# Altium integrated library Serigrafias.IntLib: 13 symbols
Pins are listed as number, name and electrical type; pins without a type are passive.

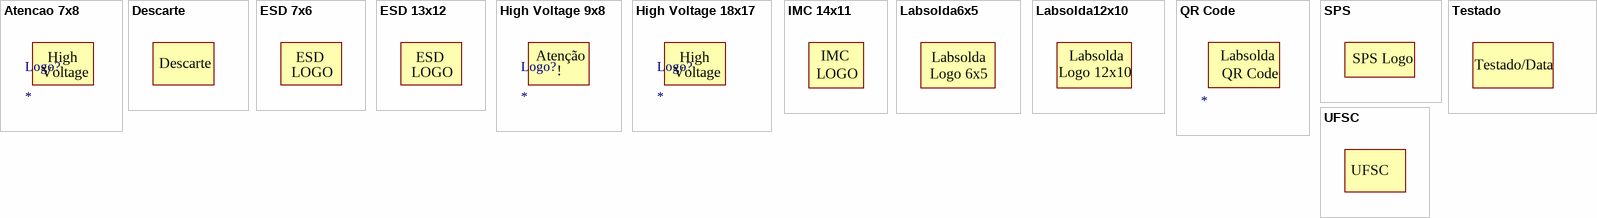
[diagram p0: symbols Atencao 7x8 to UFSC]

## Atencao 7x8
designator Logo?  (no BOM)
footprint Atencao 7x8
text: High; Voltage

## Descarte
designator Logo?  (value not drawn)  (no BOM)
footprint DESCARTE7x7
footprint DESCARTE 11X11

## ESD 7x6
designator Logo?  (value not drawn)  (no BOM)
footprint ESD 7x6
text: ESD; LOGO

## ESD 13x12
designator Logo?  (value not drawn)  (no BOM)
footprint ESD13x12
text: ESD; LOGO

## High Voltage 9x8
designator Logo?  (no BOM)
footprint High Voltage 9x8
text: Atenção; !

## High Voltage 18x17
designator Logo?  (no BOM)
footprint High Voltage 18x17
text: High; Voltage

## IMC 14x11
designator Logo?  (value not drawn)  (no BOM)
footprint IMC14x11
text: IMC; LOGO

## Labsolda6x5
designator Logo?  (value not drawn)  (no BOM)
footprint LABSOLDA 6x5
footprint LABSOLDA 6x5 - Bottom
text: Labsolda; Logo 6x5

## Labsolda12x10
designator Logo?  (value not drawn)  (no BOM)
footprint LABSOLDA 12x10
text: Labsolda; Logo 12x10

## QR Code
designator Logo?  (no BOM)
QR Code URL Labsolda 16x16mm
footprint QR Code (16x16mm)
text: Labsolda

## SPS
designator Logo?  (value not drawn)  (no BOM)
footprint SPS
text: SPS Logo

## Testado
designator Logo?  (value not drawn)  (no BOM)
footprint Testado
text: Testado/Data

## UFSC
designator Logo?  (value not drawn)  (no BOM)
footprint UFSC 1.5x1.5
footprint UFSC 3x3